# Altium footprint library Orion-Bridge.PcbLib: 20 footprints (part 1 of 2)
Each footprint in its own frame and in the unit in brackets; x right, y up, seen from the top. Pads: shape width x height; smd on the part's side, far side on the other; paste and mask are expansions set on the pad; w line width, h text height; cw(c..) or ccw(c..) is an arc to the next point about the centre after c.
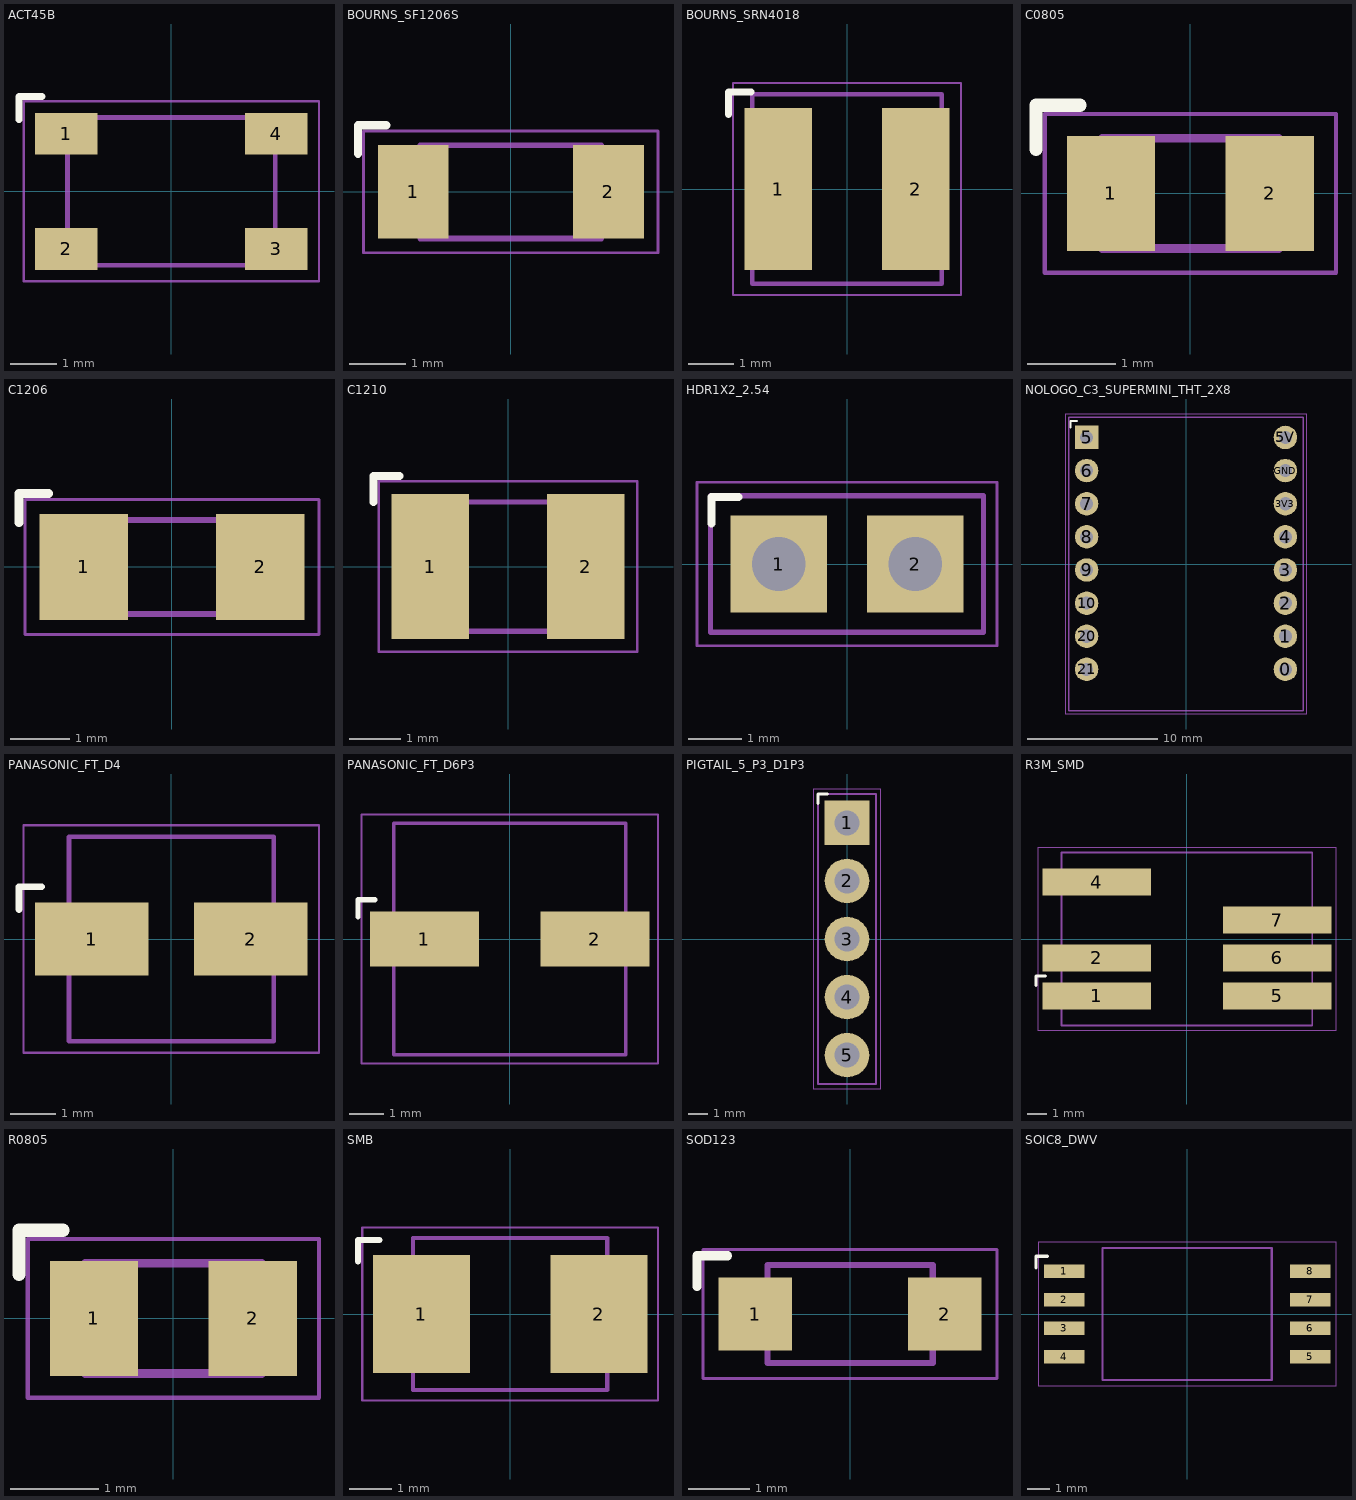
[diagram p0: the footprints below, top view; thin cyan lines are the x and y axes]

## ACT45B [mm] "TDK ACT45B recommended lands; windings 1-4 and 2-3"
height 2.8
pads (4):
  rect 1.35x0.9 smd: 1(-2.275,1.25) 2(-2.275,-1.25) 3(2.275,-1.25) 4(2.275,1.25)
Top Overlay:
  lines w0.15: -3.3,1.55 -3.3,2.05 -2.8,2.05
Component bodies:
  lines w0.1: -2.25,-1.6 2.25,-1.6 2.25,1.6 -2.25,1.6 -2.25,-1.6
Courtyards:
  lines w0.05: -3.2,-1.95 3.2,-1.95 3.2,1.95 -3.2,1.95 -3.2,-1.95
3D body: height 2.8, standoff 0.12, extent -2.25,-1.6 2.25,1.6
3D body: height 0.28, standoff 0.02, extent -2.575,0.935 -1.9,1.565
3D body: height 0.28, standoff 0.02, extent -2.575,-1.565 -1.9,-0.935
3D body: height 0.28, standoff 0.02, extent 1.9,-1.565 2.575,-0.935
3D body: height 0.28, standoff 0.02, extent 1.9,0.935 2.575,1.565

## BOURNS_SF1206S [mm] "Bourns SF-1206S recommended land pattern: total X span 4.7, inner gap 2.2, pad Y 1.65; maximum body envelope. No polarity."
height 0.7
pads (2):
  rect 1.25x1.65 smd: 1(-1.725,0) 2(1.725,0)
Top Overlay:
  lines w0.15: -2.7,0.675 -2.7,1.175 -2.2,1.175
Component bodies:
  lines w0.1: -1.6,-0.825 1.6,-0.825 1.6,0.825 -1.6,0.825 -1.6,-0.825
Courtyards:
  lines w0.05: -2.6,-1.075 2.6,-1.075 2.6,1.075 -2.6,1.075 -2.6,-1.075
3D body: height 0.7, standoff 0.15, extent -1.6,-0.825 1.6,0.825
3D body: height 0.72, standoff 0.02, extent -1.6,-0.835 -1.088,0.835
3D body: height 0.72, standoff 0.02, extent 1.088,-0.835 1.6,0.835

## BOURNS_SRN4018 [mm] "Bourns SRN4018 recommended land pattern: 4.55 total X, two 1.5 x 3.6 pads. Maximum body envelope 4.2 x 4.2. No polarity."
height 1.8
pads (2):
  rect 1.5x3.6 smd: 1(-1.525,0) 2(1.525,0)
Top Overlay:
  lines w0.15: -2.625,1.65 -2.625,2.15 -2.125,2.15
Component bodies:
  lines w0.1: -2.1,-2.1 2.1,-2.1 2.1,2.1 -2.1,2.1 -2.1,-2.1
Courtyards:
  lines w0.05: -2.525,-2.35 2.525,-2.35 2.525,2.35 -2.525,2.35 -2.525,-2.35
3D body: height 1.8, standoff 0.12, extent -2.1,-2.1 2.1,2.1
3D body: height 0.28, standoff 0.02, extent -1.937,-1.17 -1.112,1.17
3D body: height 0.28, standoff 0.02, extent 1.112,-1.17 1.937,1.17

## C0805 [mm] "0805 generic capacitor lands; MPN review"
height 1.2
pads (2):
  rect 1x1.3 smd: 1(-0.9,0) 2(0.9,0)
Top Overlay:
  lines w0.15: -1.75,0.5 -1.75,1 -1.25,1
Component bodies:
  lines w0.1: -1,-0.625 1,-0.625 1,0.625 -1,0.625 -1,-0.625
Courtyards:
  lines w0.05: -1.65,-0.9 1.65,-0.9 1.65,0.9 -1.65,0.9 -1.65,-0.9
3D body: height 1.2, standoff 0.12, extent -1,-0.625 1,0.625
3D body: height 1.22, standoff 0.02, extent -1,-0.635 -0.6,0.635
3D body: height 1.22, standoff 0.02, extent 0.6,-0.635 1,0.635

## C1206 [mm] "1206 generic capacitor lands; effective capacitance review"
height 1.6
pads (2):
  rect 1.5x1.8 smd: 1(-1.5,0) 2(1.5,0)
Top Overlay:
  lines w0.15: -2.6,0.75 -2.6,1.25 -2.1,1.25
Component bodies:
  lines w0.1: -1.6,-0.8 1.6,-0.8 1.6,0.8 -1.6,0.8 -1.6,-0.8
Courtyards:
  lines w0.05: -2.5,-1.15 2.5,-1.15 2.5,1.15 -2.5,1.15 -2.5,-1.15
3D body: height 1.6, standoff 0.12, extent -1.6,-0.8 1.6,0.8
3D body: height 1.63, standoff 0.02, extent -1.6,-0.81 -1.2,0.81
3D body: height 1.63, standoff 0.02, extent 1.2,-0.81 1.6,0.81

## C1210 [mm] "1210 generic capacitor lands; effective capacitance review"
height 2.5
pads (2):
  rect 1.5x2.8 smd: 1(-1.5,0) 2(1.5,0)
Top Overlay:
  lines w0.15: -2.6,1.25 -2.6,1.75 -2.1,1.75
Component bodies:
  lines w0.1: -1.6,-1.25 1.6,-1.25 1.6,1.25 -1.6,1.25 -1.6,-1.25
Courtyards:
  lines w0.05: -2.5,-1.65 2.5,-1.65 2.5,1.65 -2.5,1.65 -2.5,-1.65
3D body: height 2.5, standoff 0.12, extent -1.6,-1.25 1.6,1.25
3D body: height 2.52, standoff 0.02, extent -1.6,-1.26 -1.2,1.26
3D body: height 2.52, standoff 0.02, extent 1.2,-1.26 1.6,1.26

## HDR1X2_2.54 [mm] "TBD 2.54 mm service jumper; open BEFORE connecting USB"
height 6
pads (2):
  rect 1.8x1.8 hole 1: 1(-1.27,0) 2(1.27,0)
Top Overlay:
  lines w0.15: -2.52,0.75 -2.52,1.25 -2.02,1.25
Component bodies:
  lines w0.1: -2.54,-1.27 2.54,-1.27 2.54,1.27 -2.54,1.27 -2.54,-1.27
Courtyards:
  lines w0.05: -2.79,-1.52 2.79,-1.52 2.79,1.52 -2.79,1.52 -2.79,-1.52
3D body: height 2.6, standoff 0.1, extent -2.54,-1.27 2.54,1.27
3D body: height 6, standoff -2.5, extent -1.59,-0.32 -0.95,0.32
3D body: height 6, standoff -2.5, extent 0.95,-0.32 1.59,0.32
3D body: height 6.8, standoff 3.2, extent -2.55,-1.25 2.55,1.25
3D body: height 7.2, standoff 6.8, extent -2.1,-1.15 2.1,1.15

## NOLOGO_C3_SUPERMINI_THT_2X8 [mm] "Nologo 16-pin carrier interface; 15.24 mm rows / 2.54 mm pitch. Local assembly-model height 7.2 mm assumes 3.1 mm carrier-to-module underside, 1.0 mm module PCB and 3.1 mm USB body. This is not a verified manufacturer maximum; actual header seating and module revision must be checked."
height 7.2
pads (16):
  round 1.8 hole 1: 0(7.62,-8.079) 1(7.62,-5.539) 2(7.62,-2.999) 3(7.62,-0.459) 3V3(7.62,4.621) 4(7.62,2.081) 5V(7.62,9.701) 6(-7.62,7.161) 7(-7.62,4.621) 8(-7.62,2.081) 9(-7.62,-0.459) 10(-7.62,-2.999) 20(-7.62,-5.539) 21(-7.62,-8.079) GND(7.62,7.161)
  rect 1.8x1.8 hole 1: 5(-7.62,9.701)
Top Overlay:
  lines w0.15: -8.87,10.451 -8.87,10.951 -8.37,10.951
Component bodies:
  lines w0.1: -9,-11.25 9,-11.25 9,11.25 -9,11.25 -9,-11.25
Courtyards:
  lines w0.05: -9.25,-11.5 9.25,-11.5 9.25,11.5 -9.25,11.5 -9.25,-11.5
3D body: height 3.1, standoff 0.1, extent -8.89,-9.349 -6.35,10.971
3D body: height 3.1, standoff 0.1, extent 6.35,-9.349 8.89,10.971
3D body: height 4.5, standoff -2.5, extent -7.94,9.381 -7.3,10.021
3D body: height 4.5, standoff -2.5, extent -7.94,6.841 -7.3,7.481
3D body: height 4.5, standoff -2.5, extent -7.94,4.301 -7.3,4.941
3D body: height 4.5, standoff -2.5, extent -7.94,1.761 -7.3,2.401
3D body: height 4.5, standoff -2.5, extent -7.94,-0.779 -7.3,-0.139
3D body: height 4.5, standoff -2.5, extent -7.94,-3.319 -7.3,-2.679
3D body: height 4.5, standoff -2.5, extent -7.94,-5.859 -7.3,-5.219
3D body: height 4.5, standoff -2.5, extent -7.94,-8.399 -7.3,-7.759
3D body: height 4.5, standoff -2.5, extent 7.3,9.381 7.94,10.021
3D body: height 4.5, standoff -2.5, extent 7.3,6.841 7.94,7.481
3D body: height 4.5, standoff -2.5, extent 7.3,4.301 7.94,4.941
3D body: height 4.5, standoff -2.5, extent 7.3,1.761 7.94,2.401
3D body: height 4.5, standoff -2.5, extent 7.3,-0.779 7.94,-0.139
3D body: height 4.5, standoff -2.5, extent 7.3,-3.319 7.94,-2.679
3D body: height 4.5, standoff -2.5, extent 7.3,-5.859 7.94,-5.219
3D body: height 4.5, standoff -2.5, extent 7.3,-8.399 7.94,-7.759
3D body: height 4.1, standoff 3.1, extent -9,-11.25 9,11.25
3D body: height 5.05, standoff 4.1, extent -2.5,-4 2.5,1
3D body: height 7.2, standoff 6.85, extent -4.4,4.55 4.4,11.75
3D body: height 4.45, standoff 4.1, extent -4.4,4.55 4.4,11.75
3D body: height 6.85, standoff 4.45, extent -4.4,4.55 -4.1,11.75
3D body: height 6.85, standoff 4.45, extent 4.1,4.55 4.4,11.75
3D body: height 5.85, standoff 5.5, extent -3.25,7.85 3.25,11.45
3D body: height 5.15, standoff 4.1, extent -1.6,-10.85 1.6,-9.25
3D body: height 4.7, standoff 4.1, extent -7.45,0.65 -4.15,3.95
3D body: height 5.2, standoff 4.7, extent -6.6,1.5 -5,3.1
3D body: height 4.7, standoff 4.1, extent 4.15,0.65 7.45,3.95
3D body: height 5.2, standoff 4.7, extent 5,1.5 6.6,3.1

## PANASONIC_FT_D4 [mm] "Panasonic FT standard size B land pattern: a=1.0 gap, b=2.5 pad length, c=1.6 pad width. Body is maximum plastic-base envelope; can nominal diameter 4.0. Pin 1 positive, pin 2 negative."
height 6.1
pads (2):
  rect 2.5x1.6 smd: 1(-1.75,0) 2(1.75,0)
Top Overlay:
  lines w0.15: -3.35,0.65 -3.35,1.15 -2.85,1.15
Component bodies:
  lines w0.1: -2.25,-2.25 2.25,-2.25 2.25,2.25 -2.25,2.25 -2.25,-2.25
Courtyards:
  lines w0.05: -3.25,-2.5 3.25,-2.5 3.25,2.5 -3.25,2.5 -3.25,-2.5
3D body: height 5.8, standoff 0.6, extent -2,-2 2,2
3D body: height 6.1, standoff 5.8, extent -1.75,-1.75 1.75,1.75
3D body: height 6.11, standoff 6.1, extent -1.1,-0.04 1.1,0.04
3D body: height 6.11, standoff 6.1, extent -0.04,-1.1 0.04,1.1
3D body: height 5.6, standoff 0.7, extent 1.7,-0.6 2,0.6
3D body: height 0.65, standoff 0.05, extent -2.15,-2.15 2.15,2.15
3D body: height 0.25, standoff 0.02, extent -2.688,-0.48 -0.813,0.48
3D body: height 0.25, standoff 0.02, extent 0.813,-0.48 2.688,0.48

## PANASONIC_FT_D6P3 [mm] "Panasonic FT standard size D land pattern: a=1.8 gap, b=3.2 pad length, c=1.6 pad width. Body is maximum plastic-base envelope; can nominal diameter 6.3. Pin 1 positive, pin 2 negative."
height 6.1
pads (2):
  rect 3.2x1.6 smd: 1(-2.5,0) 2(2.5,0)
Top Overlay:
  lines w0.15: -4.45,0.65 -4.45,1.15 -3.95,1.15
Component bodies:
  lines w0.1: -3.4,-3.4 3.4,-3.4 3.4,3.4 -3.4,3.4 -3.4,-3.4
Courtyards:
  lines w0.05: -4.35,-3.65 4.35,-3.65 4.35,3.65 -4.35,3.65 -4.35,-3.65
3D body: height 5.8, standoff 0.6, extent -3.15,-3.15 3.15,3.15
3D body: height 6.1, standoff 5.8, extent -2.9,-2.9 2.9,2.9
3D body: height 6.11, standoff 6.1, extent -1.733,-0.04 1.733,0.04
3D body: height 6.11, standoff 6.1, extent -0.04,-1.733 0.04,1.733
3D body: height 5.6, standoff 0.7, extent 2.85,-0.945 3.15,0.945
3D body: height 0.65, standoff 0.05, extent -3.3,-3.3 3.3,3.3
3D body: height 0.25, standoff 0.02, extent -3.7,-0.48 -1.3,0.48
3D body: height 0.25, standoff 0.02, extent 1.3,-0.48 3.7,0.48

## PIGTAIL_5_P3_D1P3 [mm] "Designed carrier wire-solder interface, 3.0 pitch, 1.3 finished-hole target, 0.5 radial annulus. Pin numbering is logical NMEA: 1 shield, 2 NET-S, 3 NET-C, 4 CAN-H, 5 CAN-L. Cable and strain relief still require a physical selection."
height 3
pads (5):
  rect 2.3x2.3 hole 1.3: 1(0,6)
  round 2.3 hole 1.3: 2(0,3) 3(0,0) 4(0,-3) 5(0,-6)
Top Overlay:
  lines w0.15: -1.5,7 -1.5,7.5 -1,7.5
Component bodies:
  lines w0.1: -1.5,-7.5 1.5,-7.5 1.5,7.5 -1.5,7.5 -1.5,-7.5
Courtyards:
  lines w0.05: -1.75,-7.75 1.75,-7.75 1.75,7.75 -1.75,7.75 -1.75,-7.75
3D body: height 1.8, standoff -1.8, extent -0.35,5.65 0.35,6.35
3D body: height 6, standoff 1.8, extent -0.8,5.2 0.8,6.8
3D body: height 1.8, standoff -1.8, extent -0.35,2.65 0.35,3.35
3D body: height 6, standoff 1.8, extent -0.8,2.2 0.8,3.8
3D body: height 1.8, standoff -1.8, extent -0.35,-0.35 0.35,0.35
3D body: height 6, standoff 1.8, extent -0.8,-0.8 0.8,0.8
3D body: height 1.8, standoff -1.8, extent -0.35,-3.35 0.35,-2.65
3D body: height 6, standoff 1.8, extent -0.8,-3.8 0.8,-2.2
3D body: height 1.8, standoff -1.8, extent -0.35,-6.35 0.35,-5.65
3D body: height 6, standoff 1.8, extent -0.8,-6.8 0.8,-5.2

## R3M_SMD [mm] "RECOM recommended R3M SMD land pattern; 3.8 mm inner pad gap"
height 10.2
pads (6):
  rect 5.7x1.4 smd: 1(-4.75,-3) 2(-4.75,-1) 4(-4.75,3) 5(4.75,-3) 6(4.75,-1) 7(4.75,1)
Top Overlay:
  lines w0.15: -7.95,-2.45 -7.95,-1.95 -7.45,-1.95
Component bodies:
  lines w0.1: -6.6,-4.55 6.6,-4.55 6.6,4.55 -6.6,4.55 -6.6,-4.55
Courtyards:
  lines w0.05: -7.85,-4.8 7.85,-4.8 7.85,4.8 -7.85,4.8 -7.85,-4.8
3D body: height 10.2, standoff 0.3, extent -6.6,-4.55 6.6,4.55
3D body: height 10.23, standoff 10.2, extent -5.28,-2.73 5.28,2.73
3D body: height 0.3, standoff 0.02, extent -7.458,-3.42 -2.043,-2.58
3D body: height 0.3, standoff 0.02, extent -7.458,-1.42 -2.043,-0.58
3D body: height 0.3, standoff 0.02, extent -7.458,2.58 -2.043,3.42
3D body: height 0.3, standoff 0.02, extent 2.043,-3.42 7.458,-2.58
3D body: height 0.3, standoff 0.02, extent 2.043,-1.42 7.458,-0.58
3D body: height 0.3, standoff 0.02, extent 2.043,0.58 7.458,1.42

## R0805 [mm] "0805 generic resistor lands; MPN review"
height 0.6
pads (2):
  rect 1x1.3 smd: 1(-0.9,0) 2(0.9,0)
Top Overlay:
  lines w0.15: -1.75,0.5 -1.75,1 -1.25,1
Component bodies:
  lines w0.1: -1,-0.625 1,-0.625 1,0.625 -1,0.625 -1,-0.625
Courtyards:
  lines w0.05: -1.65,-0.9 1.65,-0.9 1.65,0.9 -1.65,0.9 -1.65,-0.9
3D body: height 0.6, standoff 0.12, extent -1,-0.625 1,0.625
3D body: height 0.63, standoff 0.02, extent -1,-0.635 -0.6,0.635
3D body: height 0.63, standoff 0.02, extent 0.6,-0.635 1,0.635

## SMB [mm] "DO-214AA SMB generic lands; 1=cathode 2=anode; verify vendor"
height 2.5
pads (2):
  rect 2.3x2.8 smd: 1(-2.1,0) 2(2.1,0)
Top Overlay:
  lines w0.15: -3.6,1.25 -3.6,1.75 -3.1,1.75
Component bodies:
  lines w0.1: -2.3,-1.8 2.3,-1.8 2.3,1.8 -2.3,1.8 -2.3,-1.8
Courtyards:
  lines w0.05: -3.5,-2.05 3.5,-2.05 3.5,2.05 -3.5,2.05 -3.5,-2.05
3D body: height 2.5, standoff 0.12, extent -2.3,-1.8 2.3,1.8
3D body: height 0.28, standoff 0.02, extent -2.732,-0.91 -1.468,0.91
3D body: height 0.28, standoff 0.02, extent 1.468,-0.91 2.732,0.91
3D body: height 2.51, standoff 2.5, extent -1.597,-1.674 -1.347,1.674

## SOD123 [mm] "SOD-123 generic lands; 1=cathode 2=anode; verify vendor"
height 1.2
pads (2):
  rect 1.2x1.2 smd: 1(-1.55,0) 2(1.55,0)
Top Overlay:
  lines w0.15: -2.5,0.45 -2.5,0.95 -2,0.95
Component bodies:
  lines w0.1: -1.35,-0.8 1.35,-0.8 1.35,0.8 -1.35,0.8 -1.35,-0.8
Courtyards:
  lines w0.05: -2.4,-1.05 2.4,-1.05 2.4,1.05 -2.4,1.05 -2.4,-1.05
3D body: height 1.2, standoff 0.12, extent -1.35,-0.8 1.35,0.8
3D body: height 0.28, standoff 0.02, extent -1.85,-0.42 -1,0.42
3D body: height 0.28, standoff 0.02, extent 1,-0.42 1.85,0.42
3D body: height 1.21, standoff 1.2, extent -0.989,-0.744 -0.739,0.744

## SOIC8_DWV [mm] "TI DWV0008A manufacturer land pattern; pin 1 upper left"
height 2.8
pads (8):
  rect 1.8x0.6 smd: 1(-5.45,1.905) 2(-5.45,0.635) 3(-5.45,-0.635) 4(-5.45,-1.905) 5(5.45,-1.905) 6(5.45,-0.635) 7(5.45,0.635) 8(5.45,1.905)
Top Overlay:
  lines w0.15: -6.7,2.055 -6.7,2.555 -6.2,2.555
Component bodies:
  lines w0.1: -3.75,-2.925 3.75,-2.925 3.75,2.925 -3.75,2.925 -3.75,-2.925
Courtyards:
  lines w0.05: -6.6,-3.175 6.6,-3.175 6.6,3.175 -6.6,3.175 -6.6,-3.175
3D body: height 2.8, standoff 0.12, extent -3.75,-2.925 3.75,2.925
3D body: height 0.28, standoff 0.02, extent -5.75,1.695 -3.4,2.115
3D body: height 0.28, standoff 0.02, extent -5.75,0.425 -3.4,0.845
3D body: height 0.28, standoff 0.02, extent -5.75,-0.845 -3.4,-0.425
3D body: height 0.28, standoff 0.02, extent -5.75,-2.115 -3.4,-1.695
3D body: height 0.28, standoff 0.02, extent 3.4,-2.115 5.75,-1.695
3D body: height 0.28, standoff 0.02, extent 3.4,-0.845 5.75,-0.425
3D body: height 0.28, standoff 0.02, extent 3.4,0.425 5.75,0.845
3D body: height 0.28, standoff 0.02, extent 3.4,1.695 5.75,2.115
3D body: height 2.82, standoff 2.8, extent -2.56,1.478 -2.24,1.798